# Altium footprint library TIA_LT1793_TP.PcbLib: 1 footprints
Each footprint in its own frame and in the unit in brackets; x right, y up, seen from the top. Pads: shape width x height; smd on the part's side, far side on the other; paste and mask are expansions set on the pad; w line width, h text height; cw(c..) or ccw(c..) is an arc to the next point about the centre after c.
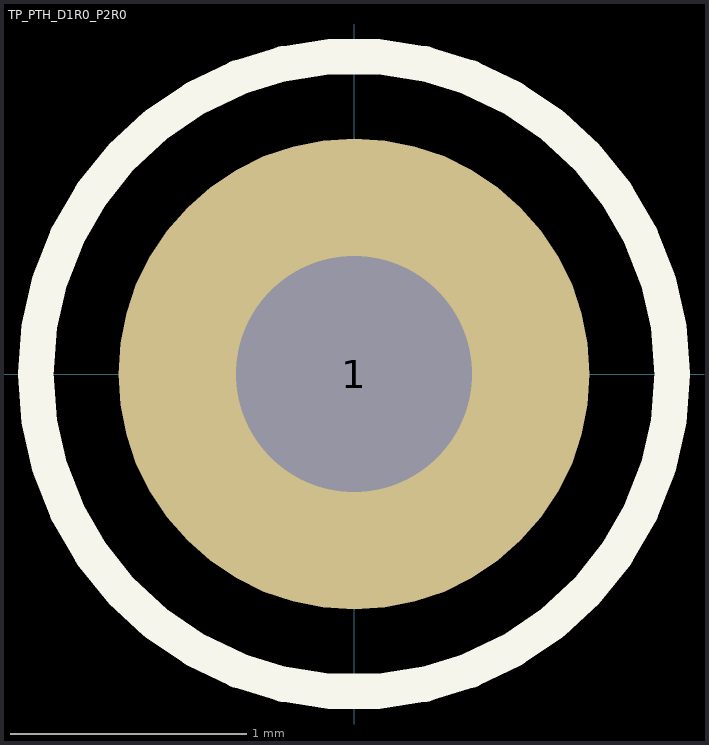
[diagram p0: the footprint, top view; thin cyan lines are the x and y axes]

## TP_PTH_D1R0_P2R0 [mm] "Punto de test pasante metalizado para cable fino: taladro 1.0 mm, pad redondo 2.0 mm, mascara abierta en ambas caras (expansion manual 0.1 mm), sin pasta. Sin componente de compra"
pads (1):
  round 2 hole 1 paste-2539.97 mask+0.1: 1(0,0)
Top Overlay:
  circle w0.15: c0,0 r1.35